# Altium schematic symbol library RRH6200.SchLib: 1 symbol
Pins are listed as number, name and electrical type; pins without a type are passive.

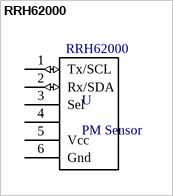
[diagram p0: symbol RRH62000]

## RRH62000
designator U, comment PM Sensor
footprint RRH62000 (PM Sensor)
pins: 1 Tx/SCL (io), 2 Rx/SDA (io), 3 Sel, 4, 5 Vcc (power), 6 Gnd (power)